# Altium footprint library Passives.PcbLib: 33 footprints (part 3 of 3)
Each footprint in its own frame and in the unit in brackets; x right, y up, seen from the top. Pads: shape width x height; smd on the part's side, far side on the other; paste and mask are expansions set on the pad; w line width, h text height; cw(c..) or ccw(c..) is an arc to the next point about the centre after c.
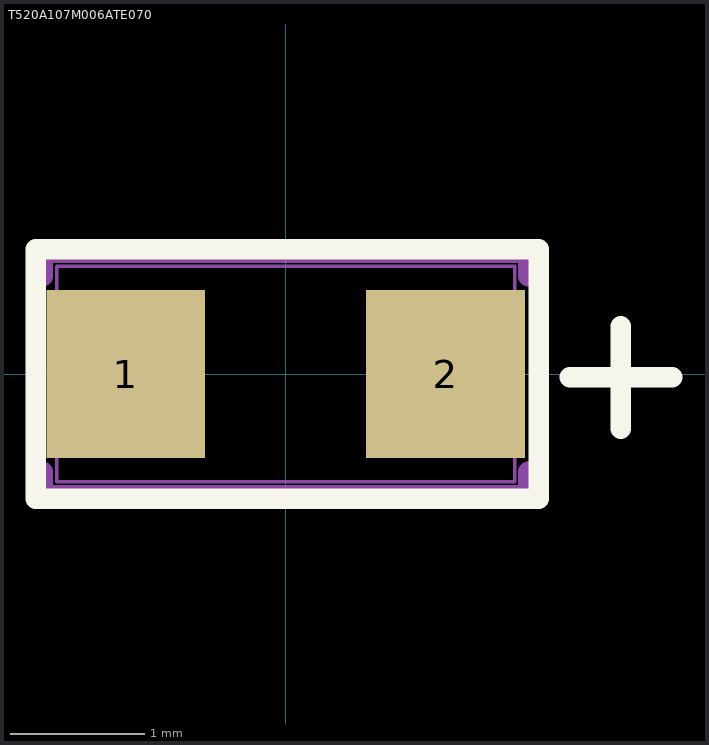
[diagram p2: the footprint, top view; thin cyan lines are the x and y axes]

## T520A107M006ATE070 [mm]
pads (2):
  rect 1.177x1.249 smd paste+0 mask+0: 1(-1.188,0) 2(1.188,0)
Top Overlay:
  lines w0.152: -0.46,-0.927 0.46,-0.927 ; 2.108,-0.025 2.87,-0.025 ; 2.489,-0.406 2.489,0.356 ; -1.854,-0.927 1.88,-0.927 1.88,0.927 0.46,0.927 -0.46,0.927 -1.854,0.927 -1.854,-0.927
Mechanical 13:
  lines w0.025: 2.108,-0.025 2.87,-0.025 ; 2.489,-0.406 2.489,0.356 ; -1.7,-0.8 -1.7,0.8 1.7,0.8 1.7,-0.8 -1.7,-0.8
Mechanical 15:
  lines w0.152: -1.802,-0.726 -1.802,-0.902 1.802,-0.902 1.802,-0.726 ; -1.802,0.726 -1.802,0.902 1.802,0.902 1.802,0.726
3D body: height 0.8, standoff 0, extent -1.651,-0.672 1.626,0.672